# Altium footprint library TitansLib.PcbLib: 333 footprints (part 18 of 21)
Each footprint in its own frame and in the unit in brackets; x right, y up, seen from the top. Pads: shape width x height; smd on the part's side, far side on the other; paste and mask are expansions set on the pad; w line width, h text height; cw(c..) or ccw(c..) is an arc to the next point about the centre after c.
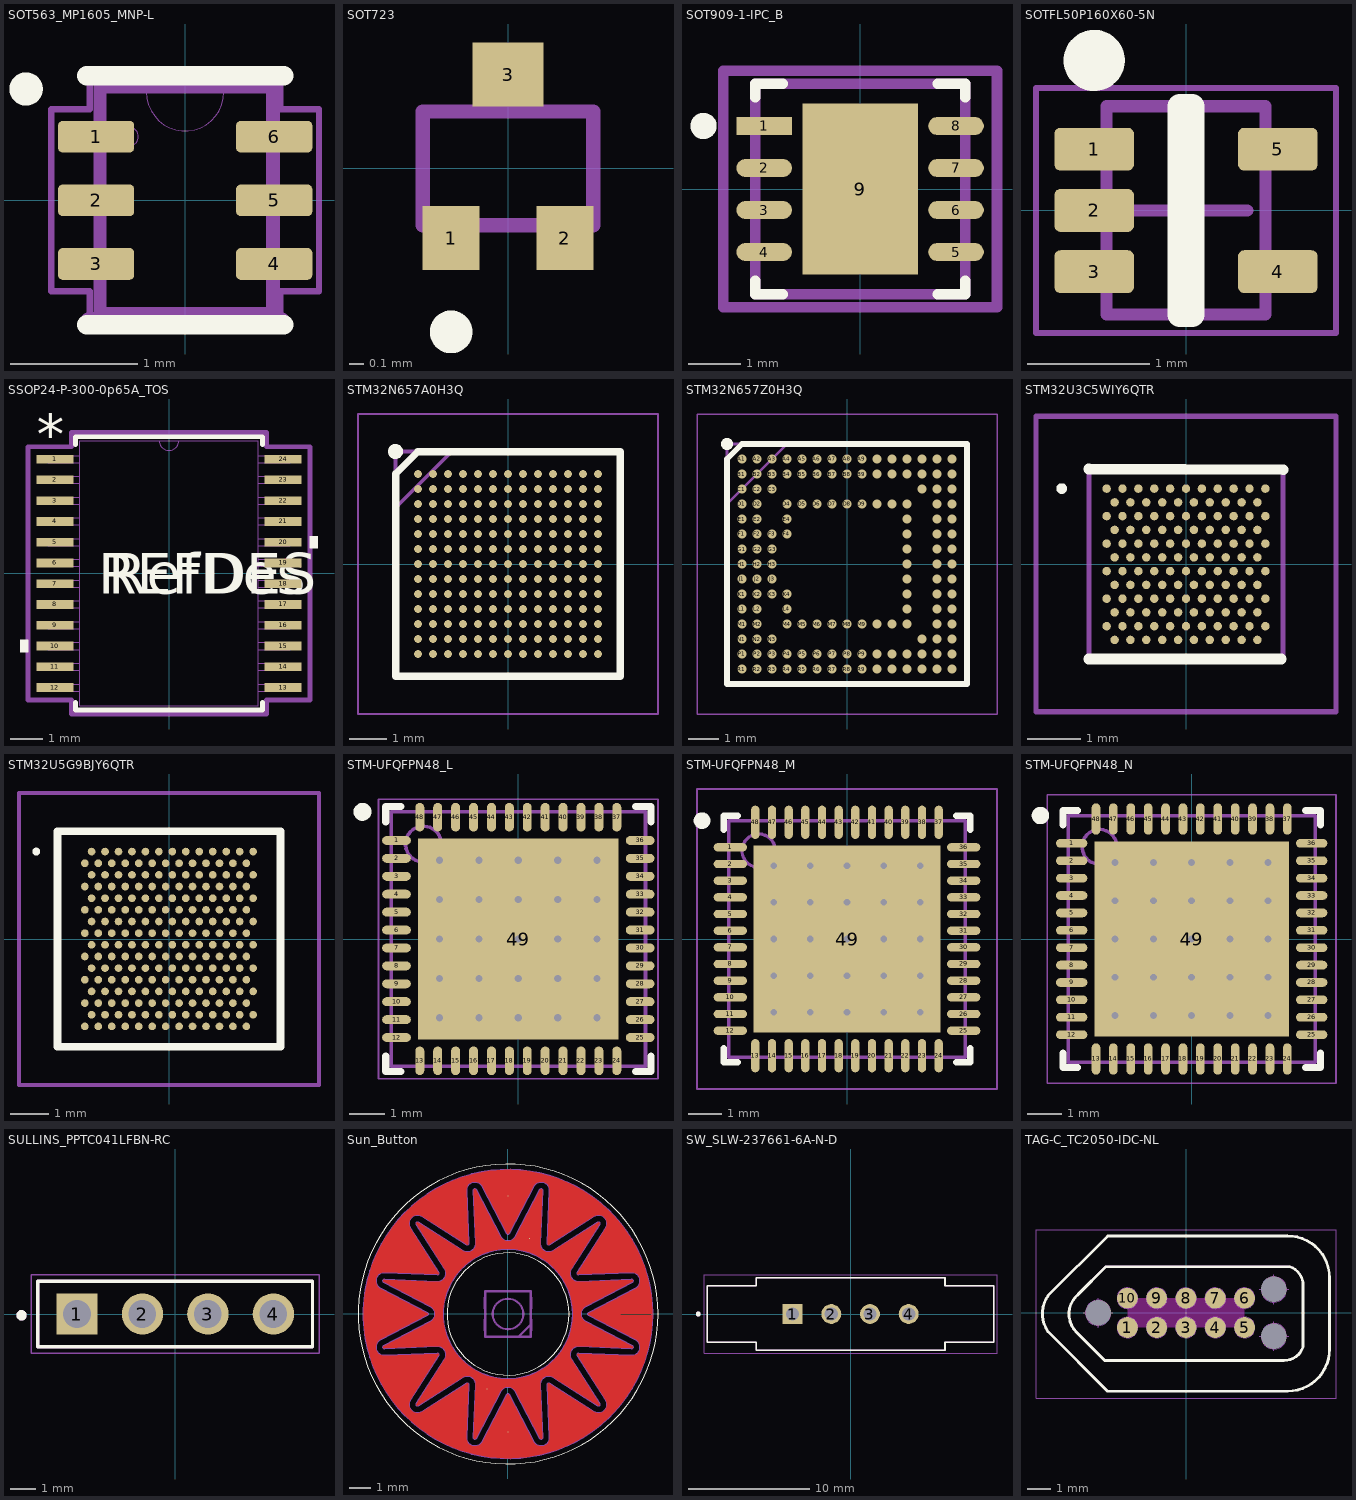
[diagram p17: the footprints below, top view; thin cyan lines are the x and y axes]

## SOT563_MP1605_MNP-L [mm]
pads (6):
  rrect30% 0.6x0.25 smd paste+0 mask+0: 1(-0.7,0.5) 2(-0.7,0) 3(-0.7,-0.5) 4(0.7,-0.5) 5(0.7,0) 6(0.7,0.5)
Top Overlay:
  circle w0.15: c-1.25,0.875 r0.056
  lines w0.152: -0.775,-0.978 0.775,-0.978 ; -0.775,0.978 0.775,0.978
Top Assembly:
  lines w0.1: -0.668,-0.901 -0.668,0.901 0.698,0.901 0.698,-0.901 -0.668,-0.901
  text ".Designator" at -0.488,-0.24 h1
Mechanical 13:
  circle w0: c-0.445,0.5 r0.076
  lines w0: -0.305,0.851 ccw(c0,0.851) 0.305,0.851
  lines w0.025: -0.648,-0.851 0.648,-0.851 0.648,0.851 -0.648,0.851 -0.648,-0.851
Mechanical 15:
  lines w0.051: -0.749,-0.953 -0.749,-0.716 -1.052,-0.716 -1.052,0.716 -0.749,0.716 -0.749,0.953 0.749,0.953 0.749,0.716 1.052,0.716 1.052,-0.716 0.749,-0.716 0.749,-0.953
  lines w0.152: -0.749,-0.953 0.749,-0.953
3D body "SOT563_MP1605_MNP.step": height 0.56, standoff 0, extent -0.851,-0.851 0.851,0.851

## SOT723 [mm]
pads (3):
  rect 0.4x0.45 smd: 1(-0.4,-0.49) 2(0.4,-0.49)
  rect 0.5x0.45 smd: 3(0,0.66)
Top Overlay:
  lines w0.2: -0.4,-1.2 cw(c-0.4,-1.15) -0.4,-1.1 ; -0.4,-1.2 ccw(c-0.4,-1.15) -0.4,-1.1 ; -0.4,-1.2 cw(c-0.4,-1.15) -0.4,-1.1
Mechanical 13:
  lines w0.1: -0.6,-0.4 -0.6,0.4 0.6,0.4 0.6,-0.4 -0.6,-0.4
3D body "DTC114EM3T5G.stp": height 0.55, standoff 0, extent -0.6,-0.525 0.6,0.675

## SOT909-1-IPC_B [mm]
pads (9):
  rect 1.059x0.342 smd paste+0 mask+0: 1(-1.827,1.2)
  rrect100% 1.059x0.342 smd paste+0 mask+0: 2(-1.827,0.4) 3(-1.827,-0.4) 4(-1.827,-1.2) 5(1.827,-1.2) 6(1.827,-0.4) 7(1.827,0.4) 8(1.827,1.2)
  rect 2.2x3.25 smd paste-1000 mask+0: 9(0,0)
Top Overlay:
  circle w0.25: c-2.981,1.2 r0.125
  lines w0.2: -2,-1.746 -2,-2 -1.475,-2 ; -2,1.746 -2,2 -1.475,2 ; 1.475,-2 2,-2 2,-1.746 ; 1.475,2 2,2 2,1.746
Top Paste:
  rectangle: -0.623,-1.148 0.623,1.148
Top 3D Body:
  lines w0.2: -2,-2 -2,2 2,2 2,-2 -2,-2
Top Courtyard:
  lines w0.2: -2.606,-2.25 -2.606,2.25 2.606,2.25 2.606,-2.25 -2.606,-2.25
Top Component Center:
  lines w0.1: -0.5,0 0.5,0 ; 0,-0.5 0,0.5
Top Assembly:
  lines w0.2: -2.606,-2.25 -2.606,2.25 2.606,2.25 2.606,-2.25 -2.606,-2.25
  text ".Designator" at -0.7,-0.012 h1
3D body "IC_NXP_Semiconductors_PCF8523TK-1_118_eec.STEP": height 0.25, standoff 0, extent -2.606,-2.25 2.606,2.25

## SOTFL50P160X60-5N [mm] "SOTFL, 5-Leads, Body 1.60x1.60mm, Pitch 0.50mm, IPC Medium Density"
height 0.6
pads (5):
  rrect28% 0.65x0.35 smd mask+0.05: 1(-0.75,0.5) 2(-0.75,0) 3(-0.75,-0.5) 4(0.75,-0.5) 5(0.75,0.5)
Top Overlay:
  circle w0.25: c-0.75,1.225 r0.125
  lines w0.2: -0.05,-0.85 0.05,-0.85 0.05,0.85 -0.05,0.85 -0.05,-0.85
Top Courtyard:
  lines w0.05: -1.225,-1 -1.225,1 1.225,1 1.225,-1 -1.225,-1
  lines w0.1: -0.5,0 0.5,0 ; 0,-0.5 0,0.5
Top Assembly:
  lines w0.1: -0.65,-0.85 -0.65,0.85 0.65,0.85 0.65,-0.85 -0.65,-0.85
3D body "SOTFL50P160X60-5N.step": height 0.6, standoff 0, extent -0.8,-0.848 0.8,0.848

## SSOP24-P-300-0p65A_TOS [mm]
pads (24):
  rect 1.161x0.271 smd paste+0 mask+0: 1(-3.575,3.575) 2(-3.575,2.925) 3(-3.575,2.275) 4(-3.575,1.625) 5(-3.575,0.975) 6(-3.575,0.325) 7(-3.575,-0.325) 8(-3.575,-0.975) 9(-3.575,-1.625) 10(-3.575,-2.275) 11(-3.575,-2.925) 12(-3.575,-3.575) 13(3.575,-3.575) 14(3.575,-2.925) 15(3.575,-2.275) 16(3.575,-1.625) 17(3.575,-0.975) 18(3.575,-0.325) 19(3.575,0.325) 20(3.575,0.975) 21(3.575,1.625) 22(3.575,2.275) 23(3.575,2.925) 24(3.575,3.575)
Top Overlay:
  region: -4.41,-2.084 -4.664,-2.084 -4.664,-2.465 -4.41,-2.465
  region: 4.41,1.165 4.664,1.165 4.664,0.784 4.41,0.784
  lines w0.152: -2.927,-4.036 -2.927,-4.277 2.927,-4.277 2.927,-4.036 ; -2.927,4.036 -2.927,4.277 2.927,4.277 2.927,4.036
  text "*" at -4.146,3.719 h1.27
  text "RefDes" at -1.905,-0.635 h1.27
  text "REFDES" at -2.222,-0.635 h1.27
Mechanical 13:
  lines w0: -0.305,4.15 ccw(c0,4.15) 0.305,4.15
  lines w0.025: -3.8,-3.685 -3.8,-3.465 -2.8,-3.465 -2.8,-3.685 -3.8,-3.685 ; -3.8,-3.035 -3.8,-2.815 -2.8,-2.815 -2.8,-3.035 -3.8,-3.035 ; -3.8,-2.385 -3.8,-2.165 -2.8,-2.165 -2.8,-2.385 -3.8,-2.385 ; -3.8,-1.735 -3.8,-1.515 -2.8,-1.515 -2.8,-1.735 -3.8,-1.735 ; -3.8,-1.085 -3.8,-0.865 -2.8,-0.865 -2.8,-1.085 -3.8,-1.085 ; -3.8,-0.435 -3.8,-0.215 -2.8,-0.215 -2.8,-0.435 -3.8,-0.435 ; -3.8,0.215 -3.8,0.435 -2.8,0.435 -2.8,0.215 -3.8,0.215 ; -3.8,0.865 -3.8,1.085 -2.8,1.085 -2.8,0.865 -3.8,0.865 ; -3.8,1.515 -3.8,1.735 -2.8,1.735 -2.8,1.515 -3.8,1.515 ; -3.8,2.165 -3.8,2.385 -2.8,2.385 -2.8,2.165 -3.8,2.165 ; -3.8,2.815 -3.8,3.035 -2.8,3.035 -2.8,2.815 -3.8,2.815 ; -3.8,3.465 -3.8,3.685 -2.8,3.685 -2.8,3.465 -3.8,3.465 ; -2.8,-4.15 2.8,-4.15 2.8,4.15 -2.8,4.15 -2.8,-4.15 ; 2.8,-3.685 2.8,-3.465 3.8,-3.465 3.8,-3.685 2.8,-3.685 ; 2.8,-3.035 2.8,-2.815 3.8,-2.815 3.8,-3.035 2.8,-3.035 ; 2.8,-2.385 2.8,-2.165 3.8,-2.165 3.8,-2.385 2.8,-2.385 ; 2.8,-1.735 2.8,-1.515 3.8,-1.515 3.8,-1.735 2.8,-1.735 ; 2.8,-1.085 2.8,-0.865 3.8,-0.865 3.8,-1.085 2.8,-1.085 ; 2.8,-0.435 2.8,-0.215 3.8,-0.215 3.8,-0.435 2.8,-0.435 ; 2.8,0.215 2.8,0.435 3.8,0.435 3.8,0.215 2.8,0.215 ; 2.8,0.865 2.8,1.085 3.8,1.085 3.8,0.865 2.8,0.865 ; 2.8,1.515 2.8,1.735 3.8,1.735 3.8,1.515 2.8,1.515 ; 2.8,2.165 2.8,2.385 3.8,2.385 3.8,2.165 2.8,2.165 ; 2.8,2.815 2.8,3.035 3.8,3.035 3.8,2.815 2.8,2.815 ; 2.8,3.465 2.8,3.685 3.8,3.685 3.8,3.465 2.8,3.465
  text "*" at -2.736,2.804 h1.27
  text "RefDes2" at -2.222,-0.635 h1.27
Mechanical 15:
  lines w0.152: -4.41,-3.964 -4.41,3.964 -3.054,3.964 -3.054,4.404 3.054,4.404 3.054,3.964 4.41,3.964 4.41,-3.964 3.054,-3.964 3.054,-4.404 -3.054,-4.404 -3.054,-3.964 -4.41,-3.964
3D body "TB6612FNG,C,8,EL.STEP": height 1.6, standoff 0, extent -3.927,-4.15 3.673,4.15

## STM32N657A0H3Q [mm]
pads (169):
  round 0.208 smd: A1(-2.4,2.4) A2(-2,2.4) A3(-1.6,2.4) A4(-1.2,2.4) A5(-0.8,2.4) A6(-0.4,2.4) A7(0,2.4) A8(0.4,2.4) A9(0.8,2.4) A10(1.2,2.4) A11(1.6,2.4) A12(2,2.4) A13(2.4,2.4) B1(-2.4,2) B2(-2,2) B3(-1.6,2) B4(-1.2,2) B5(-0.8,2) B6(-0.4,2) B7(0,2) B8(0.4,2) B9(0.8,2) B10(1.2,2) B11(1.6,2) B12(2,2) B13(2.4,2) C1(-2.4,1.6) C2(-2,1.6) C3(-1.6,1.6) C4(-1.2,1.6) C5(-0.8,1.6) C6(-0.4,1.6) C7(0,1.6) C8(0.4,1.6) C9(0.8,1.6) C10(1.2,1.6) C11(1.6,1.6) C12(2,1.6) C13(2.4,1.6) D1(-2.4,1.2) D2(-2,1.2) D3(-1.6,1.2) D4(-1.2,1.2) D5(-0.8,1.2) D6(-0.4,1.2) D7(0,1.2) D8(0.4,1.2) D9(0.8,1.2) D10(1.2,1.2) D11(1.6,1.2) D12(2,1.2) D13(2.4,1.2) E1(-2.4,0.8) E2(-2,0.8) E3(-1.6,0.8) E4(-1.2,0.8) E5(-0.8,0.8) E6(-0.4,0.8) E7(0,0.8) E8(0.4,0.8) E9(0.8,0.8) E10(1.2,0.8) E11(1.6,0.8) E12(2,0.8) E13(2.4,0.8) F1(-2.4,0.4) F2(-2,0.4) F3(-1.6,0.4) F4(-1.2,0.4) F5(-0.8,0.4) F6(-0.4,0.4) F7(0,0.4) F8(0.4,0.4) F9(0.8,0.4) F10(1.2,0.4) F11(1.6,0.4) F12(2,0.4) F13(2.4,0.4) G1(-2.4,0) G2(-2,0) G3(-1.6,0) G4(-1.2,0) G5(-0.8,0) G6(-0.4,0) G7(0,0) G8(0.4,0) G9(0.8,0) G10(1.2,0) G11(1.6,0) G12(2,0) G13(2.4,0) H1(-2.4,-0.4) H2(-2,-0.4) H3(-1.6,-0.4) H4(-1.2,-0.4) H5(-0.8,-0.4) H6(-0.4,-0.4) H7(0,-0.4) H8(0.4,-0.4) H9(0.8,-0.4) H10(1.2,-0.4) H11(1.6,-0.4) H12(2,-0.4) H13(2.4,-0.4) J1(-2.4,-0.8) J2(-2,-0.8) J3(-1.6,-0.8) J4(-1.2,-0.8) J5(-0.8,-0.8) J6(-0.4,-0.8) J7(0,-0.8) J8(0.4,-0.8) J9(0.8,-0.8) J10(1.2,-0.8) J11(1.6,-0.8) J12(2,-0.8) J13(2.4,-0.8) K1(-2.4,-1.2) K2(-2,-1.2) K3(-1.6,-1.2) K4(-1.2,-1.2) K5(-0.8,-1.2) K6(-0.4,-1.2) K7(0,-1.2) K8(0.4,-1.2) K9(0.8,-1.2) K10(1.2,-1.2) K11(1.6,-1.2) K12(2,-1.2) K13(2.4,-1.2) L1(-2.4,-1.6) L2(-2,-1.6) L3(-1.6,-1.6) L4(-1.2,-1.6) L5(-0.8,-1.6) L6(-0.4,-1.6) L7(0,-1.6) L8(0.4,-1.6) L9(0.8,-1.6) L10(1.2,-1.6) L11(1.6,-1.6) L12(2,-1.6) L13(2.4,-1.6) M1(-2.4,-2) M2(-2,-2) M3(-1.6,-2) M4(-1.2,-2) M5(-0.8,-2) M6(-0.4,-2) M7(0,-2) M8(0.4,-2) M9(0.8,-2) M10(1.2,-2) M11(1.6,-2) M12(2,-2) M13(2.4,-2) N1(-2.4,-2.4) N2(-2,-2.4) N3(-1.6,-2.4) N4(-1.2,-2.4) N5(-0.8,-2.4) N6(-0.4,-2.4) N7(0,-2.4) N8(0.4,-2.4) N9(0.8,-2.4) N10(1.2,-2.4) N11(1.6,-2.4) N12(2,-2.4) N13(2.4,-2.4)
Top Overlay:
  circle w0.2: c-3,3 r0.1
  lines w0.2: -3,-3 3,-3 3,3 -2.4,3 -3,2.4 -3,-3
Bottom Assembly:
  lines w0.05: -4,-4 4,-4 4,4 -4,4 -4,-4
Mechanical 15:
  lines w0.1: -3,1.5 -1.5,3 ; -3,-3 3,-3 3,3 -3,3 -3,-3

## STM32N657Z0H3Q [mm]
pads (142):
  round 0.298 smd mask+0: A1(-3.5,3.5) A2(-3,3.5) A3(-2.5,3.5) A4(-2,3.5) A5(-1.5,3.5) A6(-1,3.5) A7(-0.5,3.5) A8(0,3.5) A9(0.5,3.5) A10(1,3.5) A11(1.5,3.5) A12(2,3.5) A13(2.5,3.5) A14(3,3.5) A15(3.5,3.5) B1(-3.5,3) B2(-3,3) B3(-2.5,3) B4(-2,3) B5(-1.5,3) B6(-1,3) B7(-0.5,3) B8(0,3) B9(0.5,3) B10(1,3) B11(1.5,3) B12(2,3) B13(2.5,3) B14(3,3) B15(3.5,3) C1(-3.5,2.5) C2(-3,2.5) C3(-2.5,2.5) C13(2.5,2.5) C14(3,2.5) C15(3.5,2.5) D1(-3.5,2) D2(-3,2) D4(-2,2) D5(-1.5,2) D6(-1,2) D7(-0.5,2) D8(0,2) D9(0.5,2) D10(1,2) D11(1.5,2) D12(2,2) D14(3,2) D15(3.5,2) E1(-3.5,1.5) E2(-3,1.5) E4(-2,1.5) E12(2,1.5) E14(3,1.5) E15(3.5,1.5) F1(-3.5,1) F2(-3,1) F3(-2.5,1) F4(-2,1) F12(2,1) F14(3,1) F15(3.5,1) G1(-3.5,0.5) G2(-3,0.5) G3(-2.5,0.5) G12(2,0.5) G14(3,0.5) G15(3.5,0.5) H1(-3.5,0) H2(-3,0) H3(-2.5,0) H12(2,0) H14(3,0) H15(3.5,0) J1(-3.5,-0.5) J2(-3,-0.5) J3(-2.5,-0.5) J12(2,-0.5) J14(3,-0.5) J15(3.5,-0.5) K1(-3.5,-1) K2(-3,-1) K3(-2.5,-1) K4(-2,-1) K12(2,-1) K14(3,-1) K15(3.5,-1) L1(-3.5,-1.5) L2(-3,-1.5) L4(-2,-1.5) L12(2,-1.5) L14(3,-1.5) L15(3.5,-1.5) M1(-3.5,-2) M2(-3,-2) M4(-2,-2) M5(-1.5,-2) M6(-1,-2) M7(-0.5,-2) M8(0,-2) M9(0.5,-2) M10(1,-2) M11(1.5,-2) M12(2,-2) M14(3,-2) M15(3.5,-2) N1(-3.5,-2.5) N2(-3,-2.5) N3(-2.5,-2.5) N13(2.5,-2.5) N14(3,-2.5) N15(3.5,-2.5) P1(-3.5,-3) P2(-3,-3) P3(-2.5,-3) P4(-2,-3) P5(-1.5,-3) P6(-1,-3) P7(-0.5,-3) P8(0,-3) P9(0.5,-3) P10(1,-3) P11(1.5,-3) P12(2,-3) P13(2.5,-3) P14(3,-3) P15(3.5,-3) R1(-3.5,-3.5) R2(-3,-3.5) R3(-2.5,-3.5) R4(-2,-3.5) R5(-1.5,-3.5) R6(-1,-3.5) R7(-0.5,-3.5) R8(0,-3.5) R9(0.5,-3.5) R10(1,-3.5) R11(1.5,-3.5) R12(2,-3.5) R13(2.5,-3.5) R14(3,-3.5) R15(3.5,-3.5)
Top Overlay:
  circle w0.2: c-4,4 r0.1
  lines w0.2: -4,-4 4,-4 4,4 -3.5,4 -4,3.5 -4,-4
Bottom Assembly:
  lines w0.05: -5,-5 5,-5 5,5 -5,5 -5,-5
Mechanical 15:
  lines w0.1: -4,2 -2,4 ; -4,-4 4,-4 4,4 -4,4 -4,-4
3D body "STM32N657Z0H3Q.stp": height 1, standoff 0, extent -4,-4 4,4

## STM32U3C5WIY6QTR [mm]
pads (126):
  round 0.16 smd: A1(-1.5,1.43) A3(-1.2,1.43) A5(-0.9,1.43) A7(-0.6,1.43) A9(-0.3,1.43) A11(0,1.43) A13(0.3,1.43) A15(0.6,1.43) A17(0.9,1.43) A19(1.2,1.43) A21(1.5,1.43) B2(-1.35,1.17) B4(-1.05,1.17) B6(-0.75,1.17) B8(-0.45,1.17) B10(-0.15,1.17) B12(0.15,1.17) B14(0.45,1.17) B16(0.75,1.17) B18(1.05,1.17) B20(1.35,1.17) C1(-1.5,0.91) C3(-1.2,0.91) C5(-0.9,0.91) C7(-0.6,0.91) C9(-0.3,0.91) C11(0,0.91) C13(0.3,0.91) C15(0.6,0.91) C17(0.9,0.91) C19(1.2,0.91) C21(1.5,0.91) D2(-1.35,0.65) D4(-1.05,0.65) D6(-0.75,0.65) D8(-0.45,0.65) D10(-0.15,0.65) D12(0.15,0.65) D14(0.45,0.65) D16(0.75,0.65) D18(1.05,0.65) D20(1.35,0.65) E1(-1.5,0.39) E3(-1.2,0.39) E5(-0.9,0.39) E7(-0.6,0.39) E9(-0.3,0.39) E11(0,0.39) E13(0.3,0.39) E15(0.6,0.39) E17(0.9,0.39) E19(1.2,0.39) E21(1.5,0.39) F2(-1.35,0.13) F4(-1.05,0.13) F6(-0.75,0.13) F8(-0.45,0.13) F10(-0.15,0.13) F12(0.15,0.13) F14(0.45,0.13) F16(0.75,0.13) F18(1.05,0.13) F20(1.35,0.13) G1(-1.5,-0.13) G3(-1.2,-0.13) G5(-0.9,-0.13) G7(-0.6,-0.13) G9(-0.3,-0.13) G11(0,-0.13) G13(0.3,-0.13) G15(0.6,-0.13) G17(0.9,-0.13) G19(1.2,-0.13) G21(1.5,-0.13) H2(-1.35,-0.39) H4(-1.05,-0.39) H6(-0.75,-0.39) H8(-0.45,-0.39) H10(-0.15,-0.39) H12(0.15,-0.39) H14(0.45,-0.39) H16(0.75,-0.39) H18(1.05,-0.39) H20(1.35,-0.39) J1(-1.5,-0.65) J3(-1.2,-0.65) J5(-0.9,-0.65) J7(-0.6,-0.65) J9(-0.3,-0.65) J11(0,-0.65) J13(0.3,-0.65) J15(0.6,-0.65) J17(0.9,-0.65) J19(1.2,-0.65) J21(1.5,-0.65) K2(-1.35,-0.91) K4(-1.05,-0.91) K6(-0.75,-0.91) K8(-0.45,-0.91) K10(-0.15,-0.91) K12(0.15,-0.91) K14(0.45,-0.91) K16(0.75,-0.91) K18(1.05,-0.91) K20(1.35,-0.91) L1(-1.5,-1.17) L3(-1.2,-1.17) L5(-0.9,-1.17) L7(-0.6,-1.17) L9(-0.3,-1.17) L11(0,-1.17) L13(0.3,-1.17) L15(0.6,-1.17) L17(0.9,-1.17) L19(1.2,-1.17) L21(1.5,-1.17) M2(-1.35,-1.43) M4(-1.05,-1.43) M6(-0.75,-1.43) M8(-0.45,-1.43) M10(-0.15,-1.43) M12(0.15,-1.43) M14(0.45,-1.43) M16(0.75,-1.43) M18(1.05,-1.43) M20(1.35,-1.43)
Top Overlay:
  lines w0.1: -2.4,1.43 cw(c-2.35,1.43) -2.3,1.43 cw(c-2.35,1.43) -2.4,1.43
  lines w0.2: -1.835,-1.79 1.8,-1.79 ; -1.835,1.8 1.835,1.79
Bottom Assembly:
  lines w0.1: -2.835,-2.79 2.835,-2.79 ; -2.835,-2.79 -2.835,2.8 ; -2.835,-2.79 2.835,-2.79 ; -2.835,-2.79 -2.835,2.8 ; -2.835,2.8 2.835,2.8 ; -2.835,2.8 2.835,2.8 ; 2.835,-2.79 2.835,2.8 ; 2.835,-2.79 2.835,2.8
Mechanical 15:
  lines w0.1: -1.835,-1.79 1.835,-1.79 1.835,1.79 -1.835,1.79 -1.835,-1.79
3D body "STM32U3C5WIY6QTR.stp": height 0.62, standoff 0, extent -1.835,-1.84 1.835,1.74

## STM32U5G9BJY6QTR [mm]
pads (208):
  round 0.2 smd: A2(-2.013,2.273) A4(-1.663,2.273) A6(-1.313,2.273) A8(-0.963,2.273) A10(-0.613,2.273) A12(-0.263,2.273) A14(0.087,2.273) A16(0.437,2.273) A18(0.787,2.273) A20(1.137,2.273) A22(1.487,2.273) A24(1.837,2.273) A26(2.187,2.273) B1(-2.188,1.97) B3(-1.838,1.97) B5(-1.488,1.97) B7(-1.138,1.97) B9(-0.788,1.97) B11(-0.438,1.97) B13(-0.088,1.97) B15(0.262,1.97) B17(0.612,1.97) B19(0.962,1.97) B21(1.312,1.97) B23(1.662,1.97) B25(2.012,1.97) C2(-2.013,1.667) C4(-1.663,1.667) C6(-1.313,1.667) C8(-0.963,1.667) C10(-0.613,1.667) C12(-0.263,1.667) C14(0.087,1.667) C16(0.437,1.667) C18(0.787,1.667) C20(1.137,1.667) C22(1.487,1.667) C24(1.837,1.667) C26(2.187,1.667) D1(-2.188,1.364) D3(-1.838,1.364) D5(-1.488,1.364) D7(-1.138,1.364) D9(-0.788,1.364) D11(-0.438,1.364) D13(-0.088,1.364) D15(0.262,1.364) D17(0.612,1.364) D19(0.962,1.364) D21(1.312,1.364) D23(1.662,1.364) D25(2.012,1.364) E2(-2.013,1.061) E4(-1.663,1.061) E6(-1.313,1.061) E8(-0.963,1.061) E10(-0.613,1.061) E12(-0.263,1.061) E14(0.087,1.061) E16(0.437,1.061) E18(0.787,1.061) E20(1.137,1.061) E22(1.487,1.061) E24(1.837,1.061) E26(2.187,1.061) F1(-2.188,0.758) F3(-1.838,0.758) F5(-1.488,0.758) F7(-1.138,0.758) F9(-0.788,0.758) F11(-0.438,0.758) F13(-0.088,0.758) F15(0.262,0.758) F17(0.612,0.758) F19(0.962,0.758) F21(1.312,0.758) F23(1.662,0.758) F25(2.012,0.758) G2(-2.013,0.455) G4(-1.663,0.455) G6(-1.313,0.455) G8(-0.963,0.455) G10(-0.613,0.455) G12(-0.263,0.455) G14(0.087,0.455) G16(0.437,0.455) G18(0.787,0.455) G20(1.137,0.455) G22(1.487,0.455) G24(1.837,0.455) G26(2.187,0.455) H1(-2.188,0.152) H3(-1.838,0.152) H5(-1.488,0.152) H7(-1.138,0.152) H9(-0.788,0.152) H11(-0.438,0.152) H13(-0.088,0.152) H15(0.262,0.152) H17(0.612,0.152) H19(0.962,0.152) H21(1.312,0.152) H23(1.662,0.152) H25(2.012,0.152) J2(-2.013,-0.151) J4(-1.663,-0.151) J6(-1.313,-0.151) J8(-0.963,-0.151) J10(-0.613,-0.151) J12(-0.263,-0.151) J14(0.087,-0.151) J16(0.437,-0.151) J18(0.787,-0.151) J20(1.137,-0.151) J22(1.487,-0.151) J24(1.837,-0.151) J26(2.187,-0.151) K1(-2.188,-0.454) K3(-1.838,-0.454) K5(-1.488,-0.454) K7(-1.138,-0.454) K9(-0.788,-0.454) K11(-0.438,-0.454) K13(-0.088,-0.454) K15(0.262,-0.454) K17(0.612,-0.454) K19(0.962,-0.454) K21(1.312,-0.454) K23(1.662,-0.454) K25(2.012,-0.454) L2(-2.013,-0.757) L4(-1.663,-0.757) L6(-1.313,-0.757) L8(-0.963,-0.757) L10(-0.613,-0.757) L12(-0.263,-0.757) L14(0.087,-0.757) L16(0.437,-0.757) L18(0.787,-0.757) L20(1.137,-0.757) L22(1.487,-0.757) L24(1.837,-0.757) L26(2.187,-0.757) M1(-2.188,-1.06) M3(-1.838,-1.06) M5(-1.488,-1.06) M7(-1.138,-1.06) M9(-0.788,-1.06) M11(-0.438,-1.06) M13(-0.088,-1.06) M15(0.262,-1.06) M17(0.612,-1.06) M19(0.962,-1.06) M21(1.312,-1.06) M23(1.662,-1.06) M25(2.012,-1.06) N2(-2.013,-1.363) N4(-1.663,-1.363) N6(-1.313,-1.363) N8(-0.963,-1.363) N10(-0.613,-1.363) N12(-0.263,-1.363) N14(0.087,-1.363) N16(0.437,-1.363) N18(0.787,-1.363) N20(1.137,-1.363) N22(1.487,-1.363) N24(1.837,-1.363) N26(2.187,-1.363) P1(-2.188,-1.666) P3(-1.838,-1.666) P5(-1.488,-1.666) P7(-1.138,-1.666) P9(-0.788,-1.666) P11(-0.438,-1.666) P13(-0.088,-1.666) P15(0.262,-1.666) P17(0.612,-1.666) P19(0.962,-1.666) P21(1.312,-1.666) P23(1.662,-1.666) P25(2.012,-1.666) R2(-2.013,-1.969) R4(-1.663,-1.969) R6(-1.313,-1.969) R8(-0.963,-1.969) R10(-0.613,-1.969) R12(-0.263,-1.969) R14(0.087,-1.969) R16(0.437,-1.969) R18(0.787,-1.969) R20(1.137,-1.969) R22(1.487,-1.969) R24(1.837,-1.969) R26(2.187,-1.969) T1(-2.188,-2.272) T3(-1.838,-2.272) T5(-1.488,-2.272) T7(-1.138,-2.272) T9(-0.788,-2.272) T11(-0.438,-2.272) T13(-0.088,-2.272) T15(0.262,-2.272) T17(0.612,-2.272) T19(0.962,-2.272) T21(1.312,-2.272) T23(1.662,-2.272) T25(2.012,-2.272)
Top Overlay:
  lines w0.1: -3.5,2.273 cw(c-3.45,2.273) -3.4,2.273 cw(c-3.45,2.273) -3.5,2.273
  lines w0.2: -2.9,-2.8 2.9,-2.8 2.9,2.8 -2.9,2.8 -2.9,-2.8
Bottom Assembly:
  lines w0.1: -3.9,-3.8 3.9,-3.8 3.9,3.8 -3.9,3.8 -3.9,-3.8
Mechanical 15:
  lines w0.1: -2.9,-2.8 2.9,-2.8 2.9,2.8 -2.9,2.8 -2.9,-2.8

## STM-UFQFPN48_L [mm] "QFN, 48-Leads, Body 7.1x7.1mm, Pitch 0.5mm, Thermal Pad 5.6x5.6mm, IPC High Density"
height 0.6
pads (49):
  oval 0.8x0.25 smd: 1(-3.4,2.75) 2(-3.4,2.25) 3(-3.4,1.75) 4(-3.4,1.25) 5(-3.4,0.75) 6(-3.4,0.25) 7(-3.4,-0.25) 8(-3.4,-0.75) 9(-3.4,-1.25) 10(-3.4,-1.75) 11(-3.4,-2.25) 12(-3.4,-2.75) 25(3.4,-2.75) 26(3.4,-2.25) 27(3.4,-1.75) 28(3.4,-1.25) 29(3.4,-0.75) 30(3.4,-0.25) 31(3.4,0.25) 32(3.4,0.75) 33(3.4,1.25) 34(3.4,1.75) 35(3.4,2.25) 36(3.4,2.75)
  oval 0.25x0.8 smd: 13(-2.75,-3.4) 14(-2.25,-3.4) 15(-1.75,-3.4) 16(-1.25,-3.4) 17(-0.75,-3.4) 18(-0.25,-3.4) 19(0.25,-3.4) 20(0.75,-3.4) 21(1.25,-3.4) 22(1.75,-3.4) 23(2.25,-3.4) 24(2.75,-3.4) 37(2.75,3.4) 38(2.25,3.4) 39(1.75,3.4) 40(1.25,3.4) 41(0.75,3.4) 42(0.25,3.4) 43(-0.25,3.4) 44(-0.75,3.4) 45(-1.25,3.4) 46(-1.75,3.4) 47(-2.25,3.4) 48(-2.75,3.4)
  rect 5.6x5.6 smd: 49(0,0)
via 2.2,-2.2 diameter 0.5 hole 0.2
via 1.1,-2.2 diameter 0.5 hole 0.2
via 0,-2.2 diameter 0.5 hole 0.2
via -1.1,-2.2 diameter 0.5 hole 0.2
via -2.2,-2.2 diameter 0.5 hole 0.2
via 2.2,-1.1 diameter 0.5 hole 0.2
via 1.1,-1.1 diameter 0.5 hole 0.2
via 0,-1.1 diameter 0.5 hole 0.2
via -1.1,-1.1 diameter 0.5 hole 0.2
via -2.2,-1.1 diameter 0.5 hole 0.2
via 2.2,0 diameter 0.5 hole 0.2
via 1.1,0 diameter 0.5 hole 0.2
via 0,0 diameter 0.5 hole 0.2
via -1.1,0 diameter 0.5 hole 0.2
via -2.2,0 diameter 0.5 hole 0.2
via 2.2,1.1 diameter 0.5 hole 0.2
via 1.1,1.1 diameter 0.5 hole 0.2
via 0,1.1 diameter 0.5 hole 0.2
via -1.1,1.1 diameter 0.5 hole 0.2
via -2.2,1.1 diameter 0.5 hole 0.2
via 2.2,2.2 diameter 0.5 hole 0.2
via 1.1,2.2 diameter 0.5 hole 0.2
via 0,2.2 diameter 0.5 hole 0.2
via -1.1,2.2 diameter 0.5 hole 0.2
via -2.2,2.2 diameter 0.5 hole 0.2
Top Overlay:
  circle w0.25: c-4.35,3.55 r0.125
  lines w0.2: -3.7,-3.275 -3.7,-3.7 -3.275,-3.7 ; -3.7,3.275 -3.7,3.7 -3.275,3.7 ; 3.275,-3.7 3.7,-3.7 3.7,-3.275 ; 3.275,3.7 3.7,3.7 3.7,3.275
Mechanical 13:
  circle w0.1: c-2.65,2.65 r0.5
  lines w0.1: -3.55,-3.55 3.55,-3.55 3.55,3.55 -3.55,3.55 -3.55,-3.55
Mechanical 15:
  lines w0.05: -3.9,-3.9 3.9,-3.9 3.9,3.9 -3.9,3.9 -3.9,-3.9
  lines w0.1: -0.5,0 0.5,0 ; 0,-0.5 0,0.5
3D body: height 0.6, standoff 0, extent -3.55,-3.55 3.55,3.55

## STM-UFQFPN48_M [mm] "QFN, 48-Leads, Body 7.1x7.1mm, Pitch 0.5mm, Thermal Pad 5.6x5.6mm, IPC Low Density"
height 0.6
pads (49):
  oval 1x0.25 smd: 1(-3.5,2.75) 2(-3.5,2.25) 3(-3.5,1.75) 4(-3.5,1.25) 5(-3.5,0.75) 6(-3.5,0.25) 7(-3.5,-0.25) 8(-3.5,-0.75) 9(-3.5,-1.25) 10(-3.5,-1.75) 11(-3.5,-2.25) 12(-3.5,-2.75) 25(3.5,-2.75) 26(3.5,-2.25) 27(3.5,-1.75) 28(3.5,-1.25) 29(3.5,-0.75) 30(3.5,-0.25) 31(3.5,0.25) 32(3.5,0.75) 33(3.5,1.25) 34(3.5,1.75) 35(3.5,2.25) 36(3.5,2.75)
  oval 0.25x1 smd: 13(-2.75,-3.5) 14(-2.25,-3.5) 15(-1.75,-3.5) 16(-1.25,-3.5) 17(-0.75,-3.5) 18(-0.25,-3.5) 19(0.25,-3.5) 20(0.75,-3.5) 21(1.25,-3.5) 22(1.75,-3.5) 23(2.25,-3.5) 24(2.75,-3.5) 37(2.75,3.5) 38(2.25,3.5) 39(1.75,3.5) 40(1.25,3.5) 41(0.75,3.5) 42(0.25,3.5) 43(-0.25,3.5) 44(-0.75,3.5) 45(-1.25,3.5) 46(-1.75,3.5) 47(-2.25,3.5) 48(-2.75,3.5)
  rect 5.6x5.6 smd: 49(0,0)
via -2.2,2.2 diameter 0.5 hole 0.2
via -1.1,2.2 diameter 0.5 hole 0.2
via 0,2.2 diameter 0.5 hole 0.2
via 1.1,2.2 diameter 0.5 hole 0.2
via 2.2,2.2 diameter 0.5 hole 0.2
via -2.2,1.1 diameter 0.5 hole 0.2
via -1.1,1.1 diameter 0.5 hole 0.2
via 0,1.1 diameter 0.5 hole 0.2
via 1.1,1.1 diameter 0.5 hole 0.2
via 2.2,1.1 diameter 0.5 hole 0.2
via -2.2,0 diameter 0.5 hole 0.2
via -1.1,0 diameter 0.5 hole 0.2
via 0,0 diameter 0.5 hole 0.2
via 1.1,0 diameter 0.5 hole 0.2
via 2.2,0 diameter 0.5 hole 0.2
via -2.2,-1.1 diameter 0.5 hole 0.2
via -1.1,-1.1 diameter 0.5 hole 0.2
via 0,-1.1 diameter 0.5 hole 0.2
via 1.1,-1.1 diameter 0.5 hole 0.2
via 2.2,-1.1 diameter 0.5 hole 0.2
via -2.2,-2.2 diameter 0.5 hole 0.2
via -1.1,-2.2 diameter 0.5 hole 0.2
via 0,-2.2 diameter 0.5 hole 0.2
via 1.1,-2.2 diameter 0.5 hole 0.2
via 2.2,-2.2 diameter 0.5 hole 0.2
Top Overlay:
  circle w0.25: c-4.35,3.55 r0.125
  lines w0.2: -3.7,-3.275 -3.7,-3.7 -3.275,-3.7 ; -3.7,3.275 -3.7,3.7 -3.275,3.7 ; 3.275,-3.7 3.7,-3.7 3.7,-3.275 ; 3.275,3.7 3.7,3.7 3.7,3.275
Mechanical 13:
  circle w0.1: c-2.65,2.65 r0.5
  lines w0.1: -3.55,-3.55 -3.55,3.55 3.55,3.55 3.55,-3.55 -3.55,-3.55
Mechanical 15:
  lines w0.05: -4.5,-4.5 -4.5,4.5 4.5,4.5 4.5,-4.5 -4.5,-4.5
  lines w0.1: -0.5,0 0.5,0 ; 0,-0.5 0,0.5
3D body: height 0.6, standoff 0, extent -3.55,-3.55 3.55,3.55

## STM-UFQFPN48_N [mm] "QFN, 48-Leads, Body 7.1x7.1mm, Pitch 0.5mm, Thermal Pad 5.6x5.6mm, IPC Medium Density"
height 0.6
pads (49):
  oval 0.9x0.25 smd: 1(-3.45,2.75) 2(-3.45,2.25) 3(-3.45,1.75) 4(-3.45,1.25) 5(-3.45,0.75) 6(-3.45,0.25) 7(-3.45,-0.25) 8(-3.45,-0.75) 9(-3.45,-1.25) 10(-3.45,-1.75) 11(-3.45,-2.25) 12(-3.45,-2.75) 25(3.45,-2.75) 26(3.45,-2.25) 27(3.45,-1.75) 28(3.45,-1.25) 29(3.45,-0.75) 30(3.45,-0.25) 31(3.45,0.25) 32(3.45,0.75) 33(3.45,1.25) 34(3.45,1.75) 35(3.45,2.25) 36(3.45,2.75)
  oval 0.25x0.9 smd: 13(-2.75,-3.45) 14(-2.25,-3.45) 15(-1.75,-3.45) 16(-1.25,-3.45) 17(-0.75,-3.45) 18(-0.25,-3.45) 19(0.25,-3.45) 20(0.75,-3.45) 21(1.25,-3.45) 22(1.75,-3.45) 23(2.25,-3.45) 24(2.75,-3.45) 37(2.75,3.45) 38(2.25,3.45) 39(1.75,3.45) 40(1.25,3.45) 41(0.75,3.45) 42(0.25,3.45) 43(-0.25,3.45) 44(-0.75,3.45) 45(-1.25,3.45) 46(-1.75,3.45) 47(-2.25,3.45) 48(-2.75,3.45)
  rect 5.6x5.6 smd: 49(0,0)
via -2.2,2.2 diameter 0.5 hole 0.2
via -1.1,2.2 diameter 0.5 hole 0.2
via 0,2.2 diameter 0.5 hole 0.2
via 1.1,2.2 diameter 0.5 hole 0.2
via 2.2,2.2 diameter 0.5 hole 0.2
via -2.2,1.1 diameter 0.5 hole 0.2
via -1.1,1.1 diameter 0.5 hole 0.2
via 0,1.1 diameter 0.5 hole 0.2
via 1.1,1.1 diameter 0.5 hole 0.2
via 2.2,1.1 diameter 0.5 hole 0.2
via -2.2,0 diameter 0.5 hole 0.2
via -1.1,0 diameter 0.5 hole 0.2
via 0,0 diameter 0.5 hole 0.2
via 1.1,0 diameter 0.5 hole 0.2
via 2.2,0 diameter 0.5 hole 0.2
via -2.2,-1.1 diameter 0.5 hole 0.2
via -1.1,-1.1 diameter 0.5 hole 0.2
via 0,-1.1 diameter 0.5 hole 0.2
via 1.1,-1.1 diameter 0.5 hole 0.2
via 2.2,-1.1 diameter 0.5 hole 0.2
via -2.2,-2.2 diameter 0.5 hole 0.2
via -1.1,-2.2 diameter 0.5 hole 0.2
via 0,-2.2 diameter 0.5 hole 0.2
via 1.1,-2.2 diameter 0.5 hole 0.2
via 2.2,-2.2 diameter 0.5 hole 0.2
Top Overlay:
  circle w0.25: c-4.35,3.55 r0.125
  lines w0.2: -3.7,-3.275 -3.7,-3.7 -3.275,-3.7 ; -3.7,3.275 -3.7,3.7 -3.275,3.7 ; 3.275,-3.7 3.7,-3.7 3.7,-3.275 ; 3.275,3.7 3.7,3.7 3.7,3.275
Mechanical 13:
  circle w0.1: c-2.65,2.65 r0.5
  lines w0.1: -3.55,-3.55 -3.55,3.55 3.55,3.55 3.55,-3.55 -3.55,-3.55
Mechanical 15:
  lines w0.05: -4.15,-4.15 -4.15,4.15 4.15,4.15 4.15,-4.15 -4.15,-4.15
  lines w0.1: -0.5,0 0.5,0 ; 0,-0.5 0,0.5
3D body: height 0.6, standoff 0, extent -3.55,-3.55 3.55,3.55

## SULLINS_PPTC041LFBN-RC [mm]
height 8.5
pads (4):
  rect 1.605x1.605 / inner round 1.605 / far side rect 1.605x1.605 hole 1.07: 1(-3.81,0)
  round 1.605 hole 1.07: 2(-1.27,0) 3(1.27,0) 4(3.81,0)
Top Overlay:
  circle w0.2: c-5.96,-0.05 r0.1
  lines w0.127: -5.33,-1.27 -5.33,1.27 5.33,1.27 5.33,-1.27 -5.33,-1.27
Mechanical 13:
  circle w0.2: c-5.96,-0.05 r0.1
  lines w0.127: -5.33,-1.27 -5.33,1.27 5.33,1.27 5.33,-1.27 -5.33,-1.27
Mechanical 15:
  lines w0.05: -5.58,-1.52 -5.58,1.52 5.58,1.52 5.58,-1.52 -5.58,-1.52
3D body "step_temp.STEP": height 8.51, standoff -3.2, extent -5.334,-1.27 5.334,1.27

## Sun_Button [mil]
pads (4):
  round 1 smd paste-99999: 1(0,-214) 1(0,214) 2(-38,-136) 2(39,137)
Top Layer:
  region: 240 vertices and 0 holes, not listed, extent -261.81,-1.74 261.81,261.81
  region: 233 vertices and 0 holes, not listed, extent -226.36,-0.03 226.36,226.36
  region: 218 vertices and 0 holes, not listed, extent -261.81,-261.81 261.81,0
  region: 231 vertices and 0 holes, not listed, extent -226.36,-226.36 226.36,0
Top Overlay:
  circle w1.97: c0,0 r110.8
  circle w1.97: c0,0 r272.15
Top Component Center:
  lines w3.94: -41.34,-29.53 -42.13,-29.53 -42.13,-9.84 -41.34,-9.84 ; -41.34,9.84 -42.13,9.84 -42.13,29.53 -41.34,29.53 ; 41.34,-29.53 42.13,-29.53 42.13,-9.84 41.34,-9.84 ; 41.34,9.84 42.13,9.84 42.13,29.53 41.34,29.53 ; -41.34,-41.34 -41.34,41.34 ; -41.34,-41.34 41.34,-41.34 ; -41.34,-41.34 -41.34,41.34 ; -41.34,-41.34 -40.65,-40.65 ; -41.34,-41.34 41.34,-41.34 ; -41.34,41.34 41.34,41.34 ; -41.34,41.34 41.34,41.34 ; -41.34,41.34 -40.65,40.65 ; -40.65,-40.65 -40.65,40.65 ; -40.65,-40.65 19.81,-40.65 ; -40.65,40.65 40.65,40.65 ; 19.81,-40.65 40.65,-19.89 ; 19.81,-40.65 19.46,-40.99 40.99,-40.99 ; 40.65,-19.89 40.99,-19.54 40.99,-40.99 ; 40.65,-19.89 40.65,40.65 ; 40.65,40.65 41.34,41.34 ; 40.99,-40.99 41.34,-41.34 ; 41.34,-41.34 41.34,41.34 ; 41.34,-41.34 41.34,41.34 ; 0,-27.8 cw(c0,0) 0,27.8 cw(c0,0) 0,-27.8
Top Component Outline:
  circle w3.94: c0,0 r261.81
  circle w3.94: c0,0 r118.11
  lines w1.97: -261.81,0 cw(c0,0) 261.81,0
  lines w3.94: -231.67,-46.16 ccw(c-224.37,-60.12) -223.71,-75.85 -127.94,-71.85 cw(c-127.86,-73.82) -126.15,-72.83 cw(c-127.86,-73.82) -126.2,-74.87 -177.55,-155.81 ccw(c-164.25,-164.25) -155.81,-177.55 -74.87,-126.2 cw(c-73.82,-127.86) -72.83,-126.15 cw(c-73.82,-127.86) -71.85,-127.94 -75.85,-223.71 ccw(c-60.12,-224.37) -46.16,-231.67 -1.74,-146.73 cw(c0,-147.64) 0,-145.67 cw(c0,-147.64) 1.74,-146.73 46.16,-231.67 ccw(c60.12,-224.37) 75.85,-223.71 71.85,-127.94 cw(c73.82,-127.86) 72.83,-126.15 cw(c73.82,-127.86) 74.87,-126.2 155.81,-177.55 ccw(c164.25,-164.25) 177.55,-155.81 126.2,-74.87 cw(c127.86,-73.82) 126.15,-72.83 cw(c127.86,-73.82) 127.94,-71.85 223.71,-75.85 ccw(c224.37,-60.12) 231.67,-46.16 146.73,-1.74 cw(c147.64,0) 145.67,0 cw(c147.64,0) 146.73,1.74 231.67,46.16 ccw(c224.37,60.12) 223.71,75.85 127.94,71.85 cw(c127.86,73.82) 126.15,72.83 cw(c127.86,73.82) 126.2,74.87 177.55,155.81 ccw(c164.25,164.25) 155.81,177.55 74.87,126.2 cw(c73.82,127.86) 72.83,126.15 cw(c73.82,127.86) 71.85,127.94 75.85,223.71 ccw(c60.12,224.37) 46.16,231.67 1.74,146.73 cw(c0,147.64) 0,145.67 cw(c0,147.64) -1.74,146.73 -46.16,231.67 ccw(c-60.12,224.37) -75.85,223.71 -71.85,127.94 cw(c-73.82,127.86) -72.83,126.15 cw(c-73.82,127.86) -74.87,126.2 -155.81,177.55 ccw(c-164.25,164.25) -177.55,155.81 -126.2,74.87 cw(c-127.86,73.82) -126.15,72.83 cw(c-127.86,73.82) -127.94,71.85 -223.71,75.85 ccw(c-224.37,60.12) -231.67,46.16 -146.73,1.74 cw(c-147.64,0) -145.67,0 cw(c-147.64,0) -146.73,-1.74 -231.67,-46.16 ; -225.28,-58.38 ccw(c-224.37,-60.12) -224.29,-62.09 -128.52,-58.08 cw(c-127.86,-73.82) -114.22,-65.94 cw(c-127.86,-73.82) -114.56,-82.26 -165.91,-163.19 ccw(c-164.25,-164.25) -163.19,-165.91 -82.26,-114.56 cw(c-73.82,-127.86) -65.94,-114.22 cw(c-73.82,-127.86) -58.08,-128.52 -62.09,-224.29 ccw(c-60.12,-224.37) -58.38,-225.28 -13.96,-140.34 cw(c0,-147.64) 0,-131.89 cw(c0,-147.64) 13.95,-140.34 58.38,-225.28 ccw(c60.12,-224.37) 62.09,-224.29 58.08,-128.52 cw(c73.82,-127.86) 65.94,-114.22 cw(c73.82,-127.86) 82.26,-114.56 163.19,-165.91 ccw(c164.25,-164.25) 165.91,-163.19 114.56,-82.26 cw(c127.86,-73.82) 114.22,-65.94 cw(c127.86,-73.82) 128.52,-58.08 224.29,-62.09 ccw(c224.37,-60.12) 225.28,-58.38 140.34,-13.96 cw(c147.64,0) 131.89,0 cw(c147.64,0) 140.34,13.95 225.28,58.38 ccw(c224.37,60.12) 224.29,62.09 128.52,58.08 cw(c127.86,73.82) 114.22,65.94 cw(c127.86,73.82) 114.56,82.26 165.91,163.19 ccw(c164.25,164.25) 163.19,165.91 82.26,114.56 cw(c73.82,127.86) 65.94,114.22 cw(c73.82,127.86) 58.08,128.52 62.09,224.29 ccw(c60.12,224.37) 58.38,225.28 13.96,140.34 cw(c0,147.64) 0,131.89 cw(c0,147.64) -13.95,140.34 -58.38,225.28 ccw(c-60.12,224.37) -62.09,224.29 -58.08,128.52 cw(c-73.82,127.86) -65.94,114.22 cw(c-73.82,127.86) -82.26,114.56 -163.19,165.91 ccw(c-164.25,164.25) -165.91,163.19 -114.56,82.26 cw(c-127.86,73.82) -114.22,65.94 cw(c-127.86,73.82) -128.52,58.08 -224.29,62.09 ccw(c-224.37,60.12) -225.28,58.38 -140.34,13.96 cw(c-147.64,0) -131.89,0 cw(c-147.64,0) -140.34,-13.95 -225.28,-58.38

## SW_SLW-237661-6A-N-D [mm]
pads (4):
  rect 1.65x1.65 / inner round 1.65 / far side rect 1.65x1.65 hole 1.1 mask+0.102: 1(-4.8,0)
  round 1.65 hole 1.1 mask+0.102: 2(-1.6,0) 3(1.6,0) 4(4.8,0)
Top Overlay:
  circle w0.2: c-12.6,0 r0.1
  lines w0.127: -11.85,-2.35 -7.8,-2.35 -7.8,-3 7.8,-3 7.8,-2.35 11.85,-2.35 11.85,2.35 7.8,2.35 7.8,3 -7.8,3 -7.8,2.35 -11.85,2.35 -11.85,-2.35
Mechanical 13:
  circle w0.2: c-12.6,0 r0.1
  lines w0.127: -11.85,-2.35 -7.8,-2.35 -7.8,-3 7.8,-3 7.8,-2.35 11.85,-2.35 11.85,2.35 7.8,2.35 7.8,3 -7.8,3 -7.8,2.35 -11.85,2.35 -11.85,-2.35
Mechanical 15:
  lines w0.05: -12.1,-3.25 12.1,-3.25 12.1,3.25 -12.1,3.25 -12.1,-3.25
3D body "step_temp.STEP": height 12.31, standoff -2.79, extent -11.85,-3.048 11.85,2.952

## TAG-C_TC2050-IDC-NL [mm]
height 13
pads (13):
  round 0.9 smd paste+0 mask+0.05: 1(-2.54,-0.635) 2(-1.27,-0.635) 3(0,-0.635) 4(1.27,-0.635) 5(2.54,-0.635) 6(2.54,0.635) 7(1.27,0.635) 8(0,0.635) 9(-1.27,0.635) 10(-2.54,0.635)
  round 0 hole 1.1 unplated mask+0.05: 11(-3.81,0) 12(3.81,-1.015) 13(3.81,1.015)
Top Layer keep-out:
  rectangle: -2.54,-0.635 2.54,0.635
Top Overlay:
  lines w0.12: -4.67,0.796 ccw(c-3.972,-0.053) -4.755,-0.826 -3.52,-2.061 4.25,-2.061 ccw(c4.266,-1.213) 5.072,-1.476 ; -4.67,0.804 -3.473,2.001 4.491,2.001 cw(c4.227,1.195) 5.075,1.179 5.075,-1.474 ; -3.401,-3.396 -5.987,-0.81 cw(c-4.846,-0.04) -5.977,0.746 -3.388,3.335 ; -3.399,-3.394 4.41,-3.394 ccw(c4.405,-1.576) 6.223,-1.566 6.223,1.519 ccw(c4.405,1.514) 4.395,3.332 -3.386,3.332
Top Courtyard:
  lines w0.01: -6.5,-3.7 6.5,-3.7 6.5,3.6 -3.4,3.6 -6.5,3.6 -6.5,-3.7
Top Assembly:
  lines w0.01: -4.445,0 -3.175,0 ; -3.81,-0.635 -3.81,0.635 ; 3.175,-1.015 4.445,-1.015 ; 3.175,1.015 4.445,1.015 ; 3.81,-1.65 3.81,-0.38 ; 3.81,0.38 3.81,1.65
Bottom 3D Body:
  circle w0.01: c3.81,-1.015 r0.55
  circle w0.01: c3.81,1.015 r0.55
  circle w0.01: c-3.81,0 r0.55
  circle w0.01: c-2.54,0.635 r0.45
  circle w0.01: c-1.27,0.635 r0.45
  circle w0.01: c0,0.635 r0.45
  circle w0.01: c1.27,0.635 r0.45
  circle w0.01: c2.54,0.635 r0.45
  circle w0.01: c2.54,-0.635 r0.45
  circle w0.01: c1.27,-0.635 r0.45
  circle w0.01: c0,-0.635 r0.45
  circle w0.01: c-1.27,-0.635 r0.45
  circle w0.01: c-2.54,-0.635 r0.45
  lines w0.01: -3.475,1.999 -3.473,2.001 ; -3.401,-3.396 -3.399,-3.394 ; -3.388,3.335 -3.386,3.332 ; 4.392,3.335 4.395,3.332 ; 4.392,3.365 4.395,3.363 ; 5.072,-1.476 5.075,-1.474 ; -5.977,0.777 ccw(c-4.846,-0.009) -5.987,-0.779 -3.401,-3.365 -3.399,-3.363 4.41,-3.363 ccw(c4.405,-1.545) 6.223,-1.535 6.223,1.55 ccw(c4.405,1.545) 4.395,3.363 ; -5.977,0.777 -5.977,0.777 ; -5.977,0.777 -3.388,3.365 -3.386,3.363 4.395,3.363 ; -4.744,0.761 ccw(c-3.972,-0.023) -4.755,-0.795 -3.52,-2.03 4.25,-2.03 ccw(c4.266,-1.182) 5.072,-1.446 5.075,-1.443 5.075,1.21 ccw(c4.227,1.226) 4.491,2.032 -3.473,2.032 -3.475,2.03 -4.67,0.835 -4.744,0.761 ; -4.744,0.761 -4.744,0.761
  text "1" at -2.699,-0.953 h1
  text "10" at -3.016,0.318 h1
  text "9" at -1.479,0.342 h1
  text "8" at -0.209,0.342 h1
  text "7" at 1.111,0.318 h1
  text "6" at 2.381,0.318 h1
  text "5" at 2.35,-0.975 h1
  text "4" at 1,-0.95 h1
  text "3" at -0.209,-0.928 h1
  text "2" at -1.479,-0.928 h1